# Altium footprint library Connector.PcbLib: 272 footprints (part 1 of 17)
Each footprint in its own frame and in the unit in brackets; x right, y up, seen from the top. Pads: shape width x height; smd on the part's side, far side on the other; paste and mask are expansions set on the pad; w line width, h text height; cw(c..) or ccw(c..) is an arc to the next point about the centre after c.
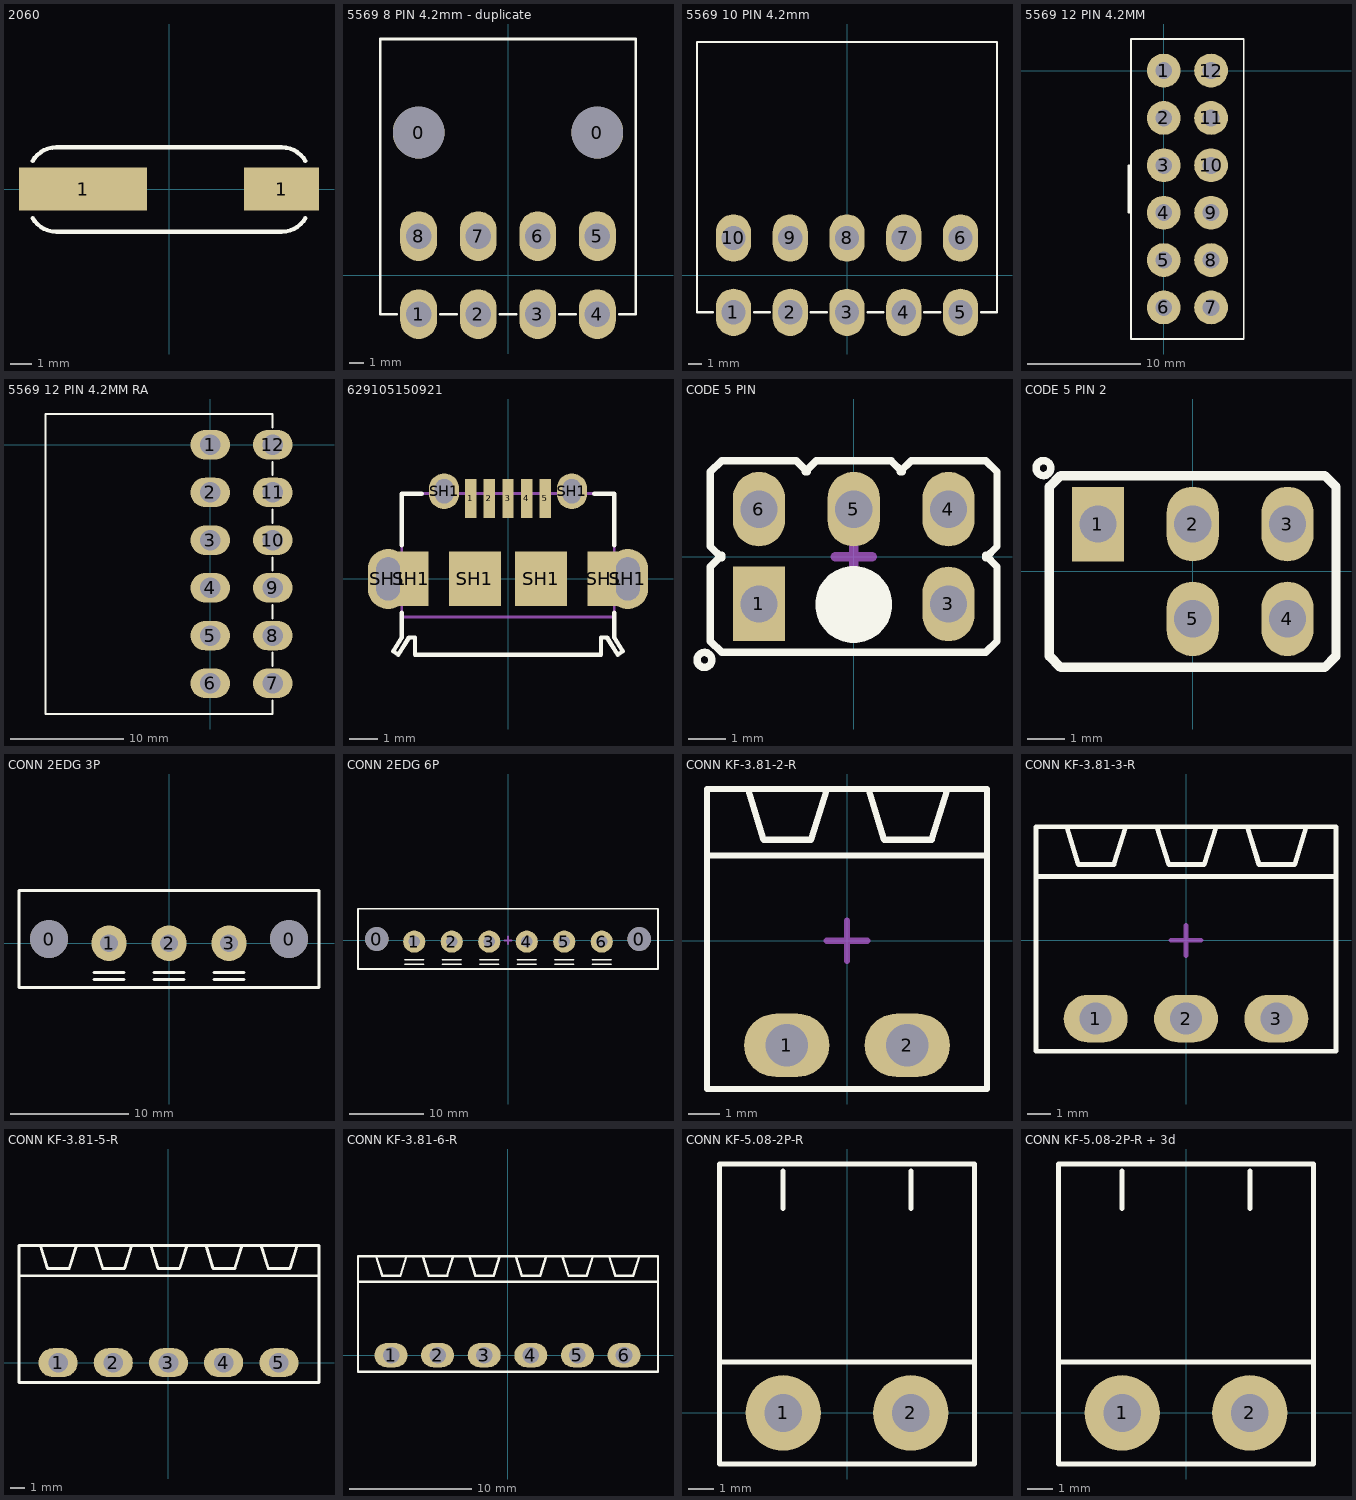
[diagram p0: the footprints below, top view; thin cyan lines are the x and y axes]

## 2060 [mm] "2060 conector LED"
pads (2):
  rect 6x2 smd: 1(-4.021,0)
  rect 3.5x2 smd: 1(5.269,0)
Top Overlay:
  lines w0.2: -6.38,-1.365 ccw(c-5.28,-0.73) -5.28,-2 5.28,-2 ccw(c5.28,-0.73) 6.38,-1.365 ; -6.38,1.315 cw(c-5.28,0.68) -5.28,1.95 -2.5,1.95 5.28,1.95 cw(c5.28,0.68) 6.38,1.315
3D body "2060.STEP": height 4.5, standoff 0, extent -6.55,-2 6.55,1.95

## 5569 8 PIN 4.2mm - duplicate [mm] "5569 8 PIN 4.2mm"
pads (10):
  round 3.65 hole 3.65: 0(-6.3,10.05) 0(6.3,10.05)
  oval 2.6x3.5 hole 1.8: 1(-6.3,-2.75) 2(-2.1,-2.75) 3(2.1,-2.75) 4(6.3,-2.75) 5(6.3,2.75) 6(2.1,2.75) 7(-2.1,2.75) 8(-6.3,2.75)
Top Overlay:
  lines w0.178: -7.83,-2.75 -9,-2.75 -9,16.65 9,16.65 9,-2.75 7.83,-2.75 ; -4.775,-2.75 -3.607,-2.75 ; -0.575,-2.75 0.593,-2.75 ; 3.625,-2.75 4.793,-2.75
Top Designator:
  text ".Designator" at -3.839,5.725 h1.52
3D body "39-30-1080.stp": height 11.4, standoff -3.6, extent -9.347,-3.277 9.053,16.658

## 5569 10 PIN 4.2mm [mm] "5569 8 PIN 4.2mm"
pads (10):
  oval 2.6x3.5 hole 1.8: 1(-8.4,-2.75) 2(-4.2,-2.75) 3(0,-2.75) 4(4.2,-2.75) 5(8.4,-2.75) 6(8.4,2.75) 7(4.2,2.75) 8(0,2.75) 9(-4.2,2.75) 10(-8.4,2.75)
Top Overlay:
  lines w0.178: -9.93,-2.75 -11.1,-2.75 -11.1,17.25 11.1,17.25 11.1,-2.75 9.93,-2.75 ; -6.875,-2.75 -5.707,-2.75 ; -2.675,-2.75 -1.507,-2.75 ; 1.525,-2.75 2.693,-2.75 ; 5.725,-2.75 6.893,-2.75
Top Designator:
  text ".Designator" at -3.71,7.156 h1.52

## 5569 12 PIN 4.2MM [mm]
pads (12):
  round 3 hole 1.5: 1(0,0) 2(0,-4.2) 3(0,-8.4) 4(0,-12.6) 5(0,-16.8) 6(0,-21) 7(4.2,-21) 8(4.2,-16.8) 9(4.2,-12.6) 10(4.2,-8.4) 11(4.2,-4.2) 12(4.2,0)
Top Overlay:
  lines w0.15: -3.025,-12.6 -3.025,-8.4 ; -2.9,-12.6 -3.15,-12.6 -3.15,-8.4 -2.9,-8.4 ; -2.9,-23.8 7.1,-23.8 7.1,2.8 -2.9,2.8 -2.9,-23.8
3D body: height 13.1, standoff 0, extent -2.9,-23.8 7.1,2.8

## 5569 12 PIN 4.2MM RA [mm]
pads (12):
  oval 3.5x2.6 hole 1.8: 1(0,0) 2(0,-4.2) 3(0,-8.4) 4(0,-12.6) 5(0,-16.8) 6(0,-21) 7(5.5,-21) 8(5.5,-16.8) 9(5.5,-12.6) 10(5.5,-8.4) 11(5.5,-4.2) 12(5.5,0)
Top Overlay:
  lines w0.15: -14.5,-23.7 -14.5,2.7
  lines w0.178: -14.5,-23.7 5.5,-23.7 5.5,-22.53 ; -14.5,2.7 5.5,2.7 5.5,1.53 ; 5.5,-19.475 5.5,-18.307 ; 5.5,-15.275 5.5,-14.107 ; 5.5,-11.075 5.5,-9.907 ; 5.5,-6.875 5.5,-5.707 ; 5.5,-2.675 5.5,-1.507
3D body: height 13.1, standoff 0, extent -14.5,-23.8 0,2.8

## 629105150921 [mm] "Micro USB 2.0 Type AB Horizontal"
height 3
pads (13):
  rect 0.4x1.35 smd: 1(-1.3,2.805) 2(-0.65,2.805) 3(0,2.805) 4(0.65,2.805) 5(1.3,2.805)
  oval 1.4x2.1 hole 0.825 slot 1.5 at 90 deg mask+0.102: SH1(-4.175,0) SH1(4.175,0)
  rect 1.2x1.9 smd: SH1(-3.369,0) SH1(3.369,0)
  oval 1.05x1.25 hole 0.65 slot 0.85 at 90 deg: SH1(-2.225,3.055) SH1(2.225,3.055)
  rect 1.8x1.9 smd: SH1(-1.15,0) SH1(1.15,0)
Top Overlay:
  lines w0.15: -3.7,-1.18 -3.7,-2.04 -4,-2.515 -3.825,-2.64 -3.45,-2.04 -3.24,-2.04 -3.24,-2.64 3.24,-2.64 3.24,-2.04 3.45,-2.04 3.825,-2.64 4,-2.515 3.7,-2.04 3.7,-1.18 ; -3.7,1.17 -3.7,2.97 -3,2.97 ; 3,2.97 3.7,2.97 3.7,1.17
Top Designator:
  text ".Designator" at -3.71,-0.157 h1.52
Mechanical 13:
  lines w0.1: -3.7,-1.33 3.7,-1.33
Mechanical 15:
  lines w0.1: -4,-2.515 -3.825,-2.64 -3.45,-2.04 -3.24,-2.04 -3.24,-2.64 3.24,-2.64 3.24,-2.04 3.45,-2.04 3.825,-2.64 4,-2.515 3.7,-2.04 3.7,2.97 -3.7,2.97 -3.7,-2.04 -4,-2.515
  text "PCB Thickness 1.2mm" at -3.5,-3.4 h0.76
  text "PCB Edge" at -1.5,-2.1 h0.76
3D body "629105150921.stp": height 2.78, standoff -0.5, extent -4.3,-2.64 4.3,3.23

## CODE 5 PIN [mm] "Connector; Header; 3x2 Position"
pads (5):
  rect 1.4x2 hole 1 mask+0.1: 1(-2.54,-1.27)
  oval 1.4x2 hole 1 mask+0.1: 3(2.54,-1.27) 4(2.54,1.27) 5(0,1.27) 6(-2.54,1.27)
Top Overlay:
  circle w0.2: c-4,-2.77 r0.2
  region: -1.023,-1.285 -1.023,-1.386 -0.984,-1.583 -0.906,-1.77 -0.794,-1.937 -0.652,-2.079 -0.485,-2.191 -0.298,-2.269 -0.101,-2.308 0,-2.308 0.101,-2.308 0.298,-2.269 0.485,-2.191 0.652,-2.079 0.794,-1.937 0.906,-1.77 0.984,-1.583 1.023,-1.386 1.023,-1.285 1.023,-1.184 0.984,-0.987 0.906,-0.8 0.794,-0.633 0.652,-0.49 0.485,-0.379 0.298,-0.301 0.101,-0.262 0,-0.262 -0.101,-0.262 -0.298,-0.301 -0.485,-0.379 -0.652,-0.49 -0.794,-0.633 -0.906,-0.8 -0.984,-0.987 -1.023,-1.184
  lines w0.2: -3.54,-0.03 -3.84,0.27 -3.84,2.27 -3.54,2.57 -1.54,2.57 -1.24,2.27 ; -3.54,0.03 -3.84,-0.27 -3.84,-2.27 -3.54,-2.57 -1.54,-2.57 ; -1.3,2.27 -1,2.57 1,2.57 1.3,2.27 ; 1.24,2.27 1.54,2.57 3.54,2.57 3.84,2.27 3.84,0.27 3.54,-0.03 ; 1.54,-2.57 3.54,-2.57 3.84,-2.27 3.84,-0.27 3.54,0.03
  lines w0.203: -1.54,-2.57 1.54,-2.57
Top Designator:
  text ".Designator" at -3.89,-0.544 h1.52
Mechanical 15:
  lines w0.254: -0.5,0 0.5,0 ; 0,-0.5 0,0.5
3D body "pin_header_aw140-eg-g02a.stp": height 8.72, standoff -3.68, extent -1.27,0.02 3.71,2.52
3D body "pin_header_aw140-eg-g02a.stp": height 8.72, standoff -3.68, extent -3.81,0.02 1.17,2.52
3D body "pin_header_aw140-eg-g02a.stp": height 8.72, standoff -3.68, extent 1.29,-2.54 3.79,2.44
3D body "pin_header_aw140-eg-g02a.stp": height 8.72, standoff -3.68, extent -3.79,-2.54 -1.29,2.44

## CODE 5 PIN 2 [mm] "Connector; Header; 3x2 Position"
pads (5):
  rect 1.4x2 hole 1 mask+0.1: 1(-2.54,1.27)
  oval 1.4x2 hole 1 mask+0.1: 2(0,1.27) 3(2.54,1.27) 4(2.54,-1.27) 5(0,-1.27)
Top Overlay:
  circle w0.2: c-4,2.77 r0.2
  lines w0.254: -3.84,-2.27 -3.84,2.27 -3.54,2.57 3.54,2.57 3.84,2.27 3.84,-2.27 3.54,-2.57 1.54,-2.57 -1.54,-2.57 -3.54,-2.57 -3.84,-2.27
Top Designator:
  text ".Designator" at -3.877,-0.157 h1.52
3D body "pin_header_aw140-eg-g02a.stp": height 8.72, standoff -3.68, extent -1.25,-2.54 1.25,2.44
3D body "pin_header_aw140-eg-g02a.stp": height 8.72, standoff -3.68, extent -1.27,0.02 3.71,2.52
3D body "pin_header_aw140-eg-g02a.stp": height 8.72, standoff -3.68, extent -3.81,0.02 1.17,2.52
3D body "pin_header_aw140-eg-g02a.stp": height 8.72, standoff -3.68, extent 1.29,-2.54 3.79,2.44

## CONN 2EDG 3P [mm]
pads (5):
  round 3.2 hole 3.2: 0(-10.16,0.35) 0(10.16,0.35)
  round 3 hole 1.5: 1(-5.08,0) 2(0,0) 3(5.08,0)
Top Overlay:
  lines w0.254: -6.33,-3.073 -3.83,-3.073 ; -6.33,-2.464 -3.83,-2.464 ; -1.25,-3.073 1.25,-3.073 ; -1.25,-2.464 1.25,-2.464 ; 3.83,-3.073 6.33,-3.073 ; 3.83,-2.464 6.33,-2.464 ; -12.7,-3.734 12.7,-3.734 12.7,4.445 -12.7,4.445 -12.7,-3.734
Top Designator:
  text ".Designator" at -3.71,0.012 h1.52
Mechanical 15:
  lines w0.254: -0.5,0 0.5,0 ; 0,-0.5 0,0.5
3D body "2EDGVM-5.08-03P-14-00AH.STEP": height 12.1, standoff -4, extent -12.7,-3.75 12.7,4.45

## CONN 2EDG 6P [mm]
pads (8):
  round 3.2 hole 3.2: 0(-17.78,0.175) 0(17.78,0.175)
  round 3 hole 1.5: 1(-12.7,-0.175) 2(-7.62,-0.175) 3(-2.54,-0.175) 4(2.54,-0.175) 5(7.62,-0.175) 6(12.7,-0.175)
Top Overlay:
  lines w0.254: -13.95,-3.248 -11.45,-3.248 ; -13.95,-2.639 -11.45,-2.639 ; -8.87,-3.248 -6.37,-3.248 ; -8.87,-2.639 -6.37,-2.639 ; -3.79,-3.248 -1.29,-3.248 ; -3.79,-2.639 -1.29,-2.639 ; 1.29,-3.248 3.79,-3.248 ; 1.29,-2.639 3.79,-2.639 ; 6.37,-3.248 8.87,-3.248 ; 6.37,-2.639 8.87,-2.639 ; 11.45,-3.248 13.95,-3.248 ; 11.45,-2.639 13.95,-2.639 ; -20.32,-3.909 20.32,-3.909 20.32,4.27 -20.32,4.27 -20.32,-3.909
Top Designator:
  text ".Designator" at -3.71,-0.163 h1.52
Mechanical 15:
  lines w0.254: -0.5,0 0.5,0 ; 0,-0.5 0,0.5
3D body "2EDGVM-5.08-06P-14-00AH.STEP": height 12.1, standoff -4, extent -20.32,-3.919 20.32,4.281

## CONN KF-3.81-2-R [mm] "FCI Pluggable Terminal Block"
height 7
pads (2):
  oval 2.7x2 hole 1.35: 1(-1.905,-3.302) 2(1.905,-3.302)
Top Overlay:
  lines w0.2: -4.425,2.698 4.425,2.698 ; -2.635,3.198 -3.135,4.798 -2.635,3.198 ; -2.635,3.198 -1.135,3.198 ; -2.635,3.198 -1.135,3.198 ; -1.135,3.198 -0.635,4.798 -1.135,3.198 ; 1.175,3.198 0.675,4.798 1.175,3.198 ; 1.175,3.198 2.675,3.198 ; 1.175,3.198 2.675,3.198 ; 2.675,3.198 3.175,4.798 2.675,3.198 ; -4.425,-4.682 -4.425,4.798 4.425,4.798 4.425,-4.682 -4.425,-4.682
Top 3D Body:
  lines w0.2: -0.635,0 0.635,0 ; 0,-0.635 0,0.635
Top Designator:
  text ".Designator" at -3.71,4.365 h1.52
3D body "70054750.stp": height 7.8, standoff -3.3, extent -4.205,-1.9 4.205,14.2
3D body "2342077-2.stp": height 7.28, standoff -1.88, extent -4.31,-4.6 4.31,4.6

## CONN KF-3.81-3-R [mm] "FCI Pluggable Terminal Block"
height 7
pads (3):
  oval 2.7x2 hole 1.35: 1(-3.81,-3.302) 2(0,-3.302) 3(3.81,-3.302)
Top Overlay:
  lines w0.2: -6.33,2.698 6.33,2.698 ; -5.04,4.798 -4.54,3.198 -3.04,3.198 -2.54,4.798 ; -1.23,4.798 -0.73,3.198 0.77,3.198 1.27,4.798 ; 2.58,4.798 3.08,3.198 4.58,3.198 5.08,4.798 ; -6.33,-4.682 -6.33,4.798 6.33,4.798 6.33,-4.682 -6.33,-4.682
Top 3D Body:
  lines w0.2: -0.635,0 0.635,0 ; 0,-0.635 0,0.635
Top Designator:
  text ".Designator" at -3.71,4.44 h1.52
3D body "2342077-3.stp": height 7.48, standoff -1.68, extent -6.215,-4.602 6.215,4.598
3D body "70054751.stp": height 7.8, standoff -3.3, extent -6.1,-1.75 6.12,14.35

## CONN KF-3.81-5-R [mm] "PHOENIX MC 1.5/5-GF-3.81"
pads (5):
  oval 2.7x2 hole 1.35: 1(-7.62,0) 2(-3.81,0) 3(0,0) 4(3.81,0) 5(7.62,0)
Top Overlay:
  lines w0.2: -10.26,6 10.38,6 ; -8.85,8.1 -8.35,6.5 -6.85,6.5 -6.35,8.1 ; -5.04,8.1 -4.54,6.5 -3.04,6.5 -2.54,8.1 ; -1.23,8.1 -0.73,6.5 0.77,6.5 1.27,8.1 ; 2.58,8.1 3.08,6.5 4.58,6.5 5.08,8.1 ; 6.39,8.1 6.89,6.5 8.39,6.5 8.89,8.1 ; -10.32,-1.38 -10.32,8.1 10.39,8.1 10.39,-1.38 -10.32,-1.38
Top Designator:
  text ".Designator" at -3.675,3.016 h1.52
3D body "User Library-1803277.STEP": height 7.35, standoff -3.3, extent -6.375,-1.3 2.635,8
3D body "User Library-1803277.STEP": height 7.35, standoff -3.3, extent -10.185,-1.3 -1.175,8
3D body "User Library-1803277.STEP": height 7.35, standoff -3.3, extent -2.565,-1.3 6.445,8
3D body "User Library-1803277.STEP": height 7.35, standoff -3.3, extent 1.245,-1.3 10.255,8

## CONN KF-3.81-6-R [mm] "PHOENIX MC 1.5/6-GF-3.81"
pads (6):
  oval 2.7x2 hole 1.35: 1(-9.525,0) 2(-5.715,0) 3(-1.905,0) 4(1.905,0) 5(5.715,0) 6(9.525,0)
Top Overlay:
  lines w0.2: -12.165,6 12.305,6 ; -10.755,8.1 -10.255,6.5 -8.755,6.5 -8.255,8.1 ; -6.945,8.1 -6.445,6.5 -4.945,6.5 -4.445,8.1 ; -3.135,8.1 -2.635,6.5 -1.135,6.5 -0.635,8.1 ; 0.675,8.1 1.175,6.5 2.675,6.5 3.175,8.1 ; 4.485,8.1 4.985,6.5 6.485,6.5 6.985,8.1 ; 8.295,8.1 8.795,6.5 10.295,6.5 10.795,8.1 ; -12.225,-1.38 -12.225,8.1 12.305,8.1 12.305,-1.38 -12.225,-1.38
Top Designator:
  text ".Designator" at -3.67,3.016 h1.52
3D body "User Library-1803277.STEP": height 7.35, standoff -3.3, extent -0.66,-1.3 8.35,8
3D body "User Library-1803277.STEP": height 7.35, standoff -3.3, extent -4.47,-1.3 4.54,8
3D body "User Library-1803277.STEP": height 7.35, standoff -3.3, extent -12.09,-1.3 -3.08,8
3D body "User Library-1803277.STEP": height 7.35, standoff -3.3, extent -8.28,-1.3 0.73,8
3D body "User Library-1803277.STEP": height 7.35, standoff -3.3, extent 3.15,-1.3 12.16,8

## CONN KF-5.08-2P-R [mm] "PHOENIX MSTB 2, 5-G, 5.08mm pitch, 2pin"
pads (2):
  round 3 hole 1.5: 1(-2.54,0) 2(2.54,0)
Top Overlay:
  lines w0.2: -5.08,2.032 5.08,2.032 ; -4.826,9.906 4.826,9.906 ; -2.54,8.128 -2.54,9.618 ; 2.54,8.128 2.54,9.618 ; -5.08,-2.032 -5.08,9.906 5.08,9.906 5.08,-2.032 -5.08,-2.032
Top Designator:
  text ".Designator" at -3.71,3.593 h1.52
3D body "PHOENIX_MSTB2.stp": height 8.6, standoff -3.5, extent -5,-2 5,10

## CONN KF-5.08-2P-R + 3d [mm] "PHOENIX MSTB 2, 5-G, 5.08mm pitch, 2pin"
pads (2):
  round 3 hole 1.5: 1(-2.54,0) 2(2.54,0)
Top Overlay:
  lines w0.2: -5.08,2.032 5.08,2.032 ; -4.826,9.906 4.826,9.906 ; -2.54,8.128 -2.54,9.618 ; 2.54,8.128 2.54,9.618 ; -5.08,-2.032 5.08,-2.032 5.08,9.906 -5.08,9.906 -5.08,-2.032
Top Designator:
  text ".Designator" at -3.71,8.19 h1.52
3D body "PHOENIX_MSTB2.stp": height 8.6, standoff -3.5, extent -5,-2 5,10
3D body "PHOENIX_MSTB2W.stp": height 15, standoff 0, extent -5,1 5,19.2